# Altium schematic symbol library Clema_IND.SchLib: 3 symbols
Pins are listed as number, name and electrical type; pins without a type are passive.

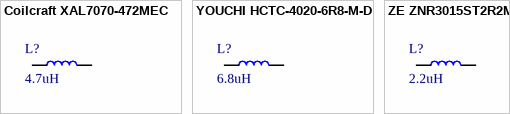
[diagram p0: symbols Coilcraft XAL7070-472MEC to ZE ZNR3015ST2R2M]

## Coilcraft XAL7070-472MEC
designator L?, comment 4.7uH
FIXED IND 4.7uH 13.6A 14.26mΩ; Manufacturer: Coilcraft; Manufacturer Part Number: XAL7070-472MEC; Type: SMD; DigiKey Part Number: 2457-XAL7070-472MEC-ND; LCSC Part Number: C3911513; Mouser Part Number: 994-XAL7070-472MEC; Package: SMD,7.5x7.2mm
footprint IND_SMD,7.5x7.2mm
pins: 1, 2

## YOUCHI HCTC-4020-6R8-M-D
designator L?, comment 6.8uH
5A 6.8uH ±20% 60mΩ 4.7A SMD,4.1x4.1mm Fixed Inductors RoHS; Manufacturer: YOUCHI; Manufacturer Part Number: HCTC-4020-6R8-M-D; LCSC Part Number: C52988778; Package: SMD,4.1x4.1mm; Type: SMD
footprint IND_SMD,4.1x4.1mm
pins: 1, 2

## ZE ZNR3015ST2R2M
designator L?, comment 2.2uH
FIXED IND 2.2uH 2A 60mΩ SMD,3x3mm; Manufacturer: ZE; Manufacturer Part Number: ZNR3015ST2R2M; LCSC Part Number: C42429102; Package: SMD,3x3mm; Type: SMD
footprint IND_SMD,3x3mm
pins: 1, 2